# Altium footprint library UCP.PcbLib: 222 footprints (part 4 of 14)
Each footprint in its own frame and in the unit in brackets; x right, y up, seen from the top. Pads: shape width x height; smd on the part's side, far side on the other; paste and mask are expansions set on the pad; w line width, h text height; cw(c..) or ccw(c..) is an arc to the next point about the centre after c.
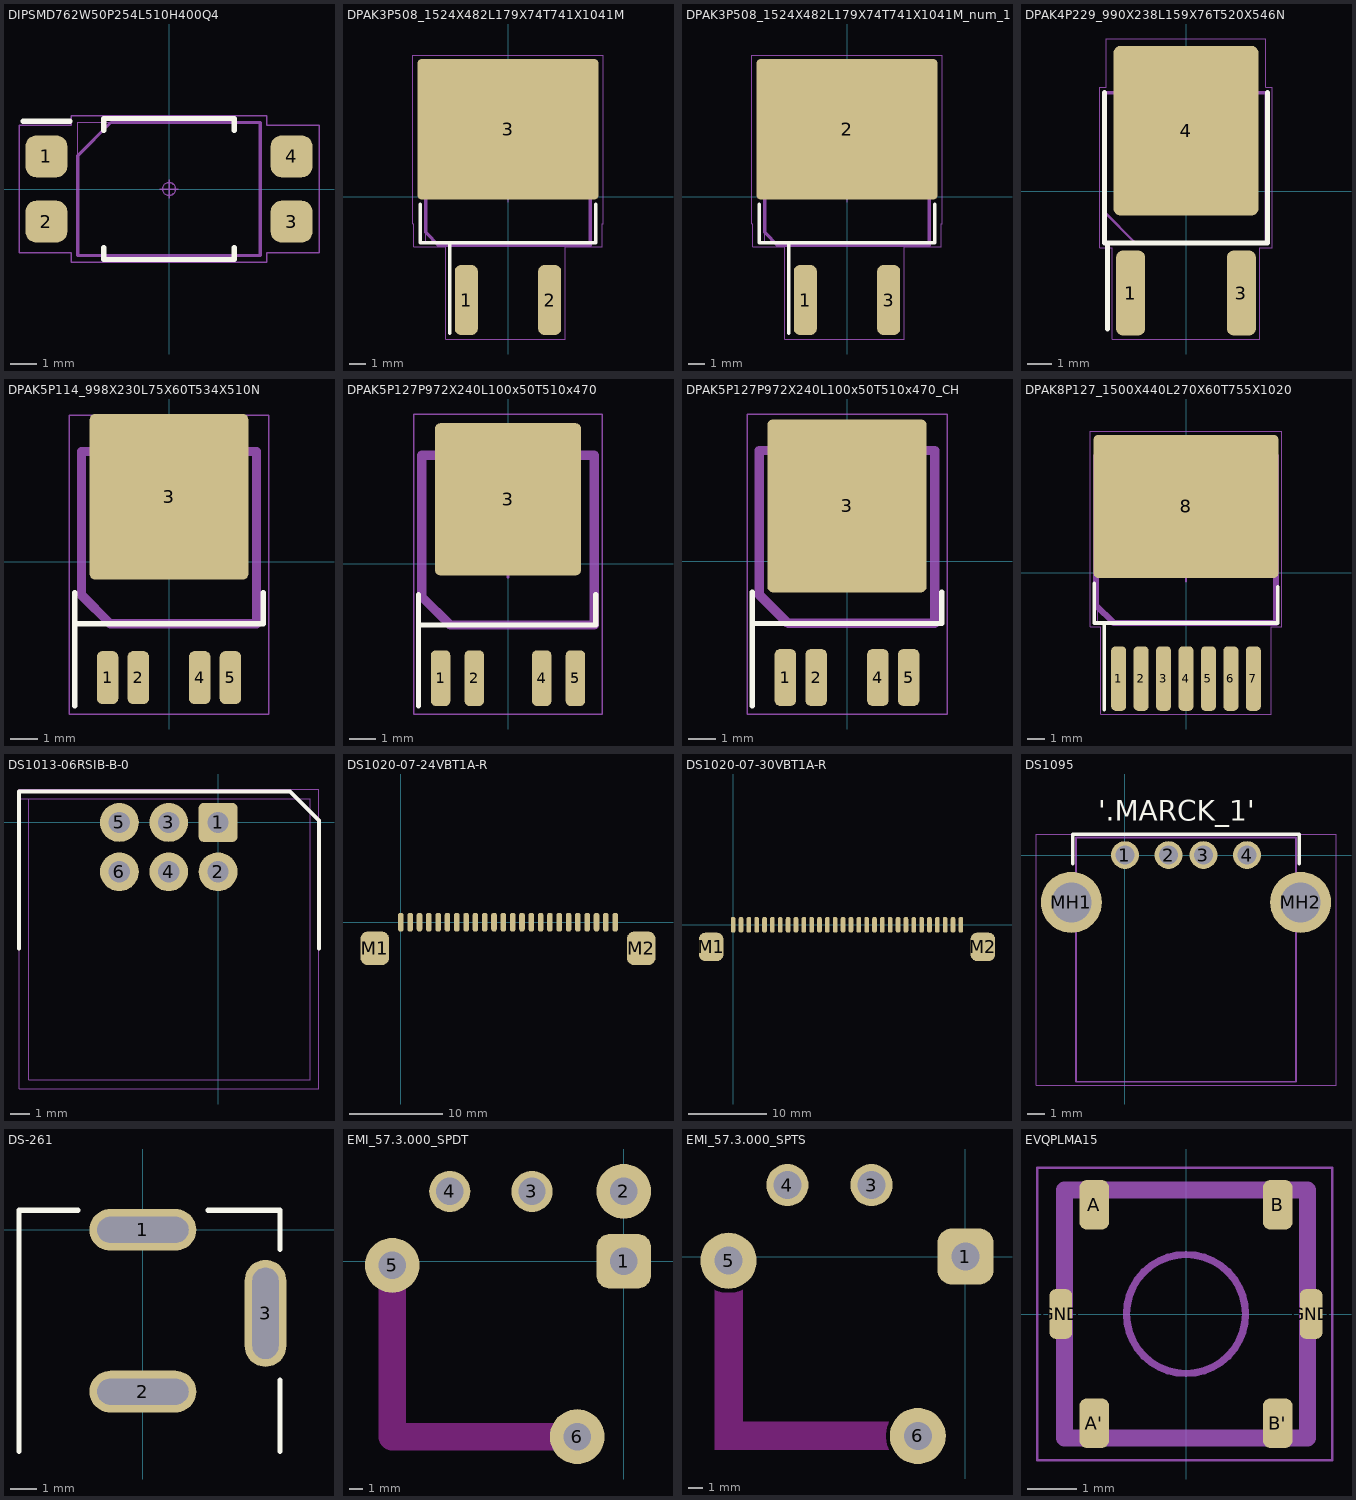
[diagram p3: the footprints below, top view; thin cyan lines are the x and y axes]

## DIPSMD762W50P254L510H400Q4 [mm] "DIP, 7.62 mm lead span, 2.54 mm pitch; 4 pin, 5.10 mm L X 7.00 mm W X 4.00 mm H body"
height 4
pads (4):
  rrect50% 1.6x1.6 smd: 1(-4.7,1.25) 2(-4.7,-1.25) 3(4.7,-1.25) 4(4.7,1.25)
Top Overlay:
  lines w0.2: -5.6,2.6 -3.8,2.6 ; -2.5,2.25 -2.5,2.7 2.5,2.7 2.5,2.25 ; -2.5,-2.25 -2.5,-2.7 2.5,-2.7 2.5,-2.25
Top Designator:
  text ".Designator" at -4.511,-0.453 h2
Top Assembly:
  lines w0.12: -3.5,-2.55 -3.5,1.28 -2.23,2.55 3.5,2.55 3.5,-2.55 -3.5,-2.55
Top Courtyard:
  circle w0.05: c0,0 r0.25
  lines w0.05: -0.35,0 0.35,0 ; 0,-0.35 0,0.35 ; -5.75,-2.45 -5.75,2.45 -3.75,2.45 -3.75,2.8 3.75,2.8 3.75,2.45 5.75,2.45 5.75,-2.45 3.75,-2.45 3.75,-2.8 -3.75,-2.8 -3.75,-2.45 -5.75,-2.45
Top Component Outline:
  lines w0.025: -3.5,-2.55 3.5,-2.55 3.5,2.55 -3.5,2.55 -3.5,-2.55
Top Component Terminal:
  lines w0.025: -5.15,-1.92 -5.15,-0.62 -4.55,-0.62 -4.55,-1.92 -5.15,-1.92 ; -5.15,0.62 -5.15,1.92 -4.55,1.92 -4.55,0.62 -5.15,0.62 ; 4.55,-1.92 4.55,-0.62 5.15,-0.62 5.15,-1.92 4.55,-1.92 ; 4.55,0.62 4.55,1.92 5.15,1.92 5.15,0.62 4.55,0.62
3D body "DIPSMD762W50P254L510H400Q4.stp": height 4.6, standoff 0, extent -5.23,-2.55 5.23,2.55

## DPAK3P508_1524X482L179X74T741X1041M [mm] "D2PAK, 5.08 mm pitch; 3 pin, 9.015 mm L X 10.16 mm W X 4.83 mm H body"
height 4.83
pads (3):
  rrect50% 1.4x4.25 smd: 1(-2.54,-6.3) 2(2.54,-6.3)
  rrect5% 11x8.55 smd paste-10.79: 3(0,4.1)
Top Overlay:
  lines w0.2: -5.34,-0.475 -5.34,-2.808 5.34,-2.808 5.34,-0.475 ; -3.54,-8.325 -3.54,-2.81
Top Paste:
  drawing of 42 lines, arcs and shapes, not listed
Top Designator:
  text ".Designator" at -4.511,-0.453 h2
Top Assembly:
  lines w0.2: -5.017,-2.175 -4.207,-2.985 5.017,-2.985 5.017,7.62 -5.017,7.62 -5.017,-2.175
Top Courtyard:
  lines w0.05: -0.35,0 0.35,0 ; 0,-0.35 0,0.35 ; -5.795,-1.66 -5.795,8.625 5.795,8.625 5.795,-1.66 5.74,-1.66 5.74,-3.058 3.49,-3.058 3.49,-8.675 -3.79,-8.675 -3.79,-3.058 -5.74,-3.058 -5.74,-1.66 -5.795,-1.66
Top Component Outline:
  lines w0.025: -5.017,-2.731 -5.017,6.414 5.017,6.414 5.017,-2.731 -5.017,-2.731
Top Component Terminal:
  lines w0.025: -5.335,0.027 5.335,0.027 5.335,7.65 -5.335,7.65 -5.335,0.027 ; -3.035,-7.62 -3.035,-5.16 -2.045,-5.16 -2.045,-7.62 -3.035,-7.62 ; 2.045,-7.62 2.045,-5.16 3.035,-5.16 3.035,-7.62 2.045,-7.62
3D body "TO-263.stp": height 4.84, standoff 0, extent -5.017,-7.621 5.017,7.619

## DPAK3P508_1524X482L179X74T741X1041M_num_1 [mm] "D2PAK, 5.08 mm pitch; 3 pin, 9.015 mm L X 10.16 mm W X 4.83 mm H body"
height 4.83
pads (3):
  rrect50% 1.4x4.25 smd paste-10: 1(-2.54,-6.3) 3(2.54,-6.3)
  rrect5% 11x8.55 smd paste-10.79: 2(0,4.1)
Top Overlay:
  lines w0.2: -5.34,-0.475 -5.34,-2.808 5.34,-2.808 5.34,-0.475 ; -3.54,-8.325 -3.54,-2.81
Top Paste:
  rectangle: -3.78,6 -2.58,7.2
  rectangle: -2.14,6 -0.94,7.2
  rectangle: -0.546,6 0.654,7.2
  rectangle: 1.049,6 2.249,7.2
  rectangle: 2.644,6 3.844,7.2
  rectangle: -3.78,4.4 -2.58,5.6
  rectangle: -2.14,4.4 -0.94,5.6
  rectangle: -0.546,4.4 0.654,5.6
  rectangle: 1.049,4.4 2.249,5.6
  rectangle: 2.644,4.4 3.844,5.6
  rectangle: -3.78,2.8 -2.58,4
  rectangle: -2.14,2.8 -0.94,4
  rectangle: -0.546,2.8 0.654,4
  rectangle: 1.049,2.8 2.249,4
  rectangle: 2.644,2.8 3.844,4
  rectangle: -3.78,1.2 -2.58,2.4
  rectangle: -2.14,1.2 -0.94,2.4
  rectangle: -0.546,1.2 0.654,2.4
  rectangle: 1.049,1.2 2.249,2.4
  rectangle: 2.644,1.2 3.844,2.4
  rectangle: -3.135,-8.275 -1.935,-4.325
  rectangle: 1.945,-8.275 3.145,-4.325
Top Designator:
  text ".Designator" at -4.511,-0.453 h2
Top Assembly:
  lines w0.2: -5.017,-2.175 -5.017,7.62 5.017,7.62 5.017,-2.985 -4.207,-2.985 -5.017,-2.175
Top Courtyard:
  lines w0.05: -0.35,0 0.35,0 ; 0,-0.35 0,0.35 ; -5.795,-1.66 -5.74,-1.66 -5.74,-3.058 -3.79,-3.058 -3.79,-8.675 3.49,-8.675 3.49,-3.058 5.74,-3.058 5.74,-1.66 5.795,-1.66 5.795,8.625 -5.795,8.625 -5.795,-1.66
Top Component Outline:
  lines w0.025: -5.017,-2.731 5.017,-2.731 5.017,6.414 -5.017,6.414 -5.017,-2.731
Top Component Terminal:
  lines w0.025: -5.335,0.027 -5.335,7.65 5.335,7.65 5.335,0.027 -5.335,0.027 ; -3.035,-7.62 -2.045,-7.62 -2.045,-5.16 -3.035,-5.16 -3.035,-7.62 ; 2.045,-7.62 3.035,-7.62 3.035,-5.16 2.045,-5.16 2.045,-7.62
3D body "TO-263.stp": height 4.84, standoff 0, extent -5.017,-7.621 5.017,7.619

## DPAK4P229_990X238L159X76T520X546N [mm] "DPAK, 2.29 mm pitch; 2 pin, 6.095 mm L X 6.54 mm W X 2.38 mm H body"
height 2.38
pads (3):
  rrect45% 1.2x3.5 smd: 1(-2.29,-4.2) 3(2.29,-4.2)
  rrect9% 6x7 smd paste-6.09: 4(0,2.51)
Top Overlay:
  lines w0.2: -3.37,4.092 -3.37,-2.127 3.37,-2.127 3.37,4.092 ; -3.25,-5.697 -3.25,-2.13
Top Paste:
  region: -0.445,3.82 -2.365,3.82 -2.365,5.26 -0.445,5.26
  region: -0.445,1.79 -2.365,1.79 -2.365,3.23 -0.445,3.23
  region: -0.445,-0.24 -2.365,-0.24 -2.365,1.2 -0.445,1.2
  region: 2.365,3.82 0.445,3.82 0.445,5.26 2.365,5.26
  region: 2.365,1.79 0.445,1.79 0.445,3.23 2.365,3.23
  region: 2.365,-0.24 0.445,-0.24 0.445,1.2 2.365,1.2
Top Designator:
  text ".Designator" at -4.511,-0.453 h2
Top Assembly:
  lines w0.1: -3.37,-0.857 -3.37,4.092 3.37,4.092 3.37,-2.127 -2.1,-2.127 -3.37,-0.857
Top Courtyard:
  circle w0.05: c0,0 r0.25
  lines w0.05: -0.35,0 0.35,0 ; 0,-0.35 0,0.35 ; -3.57,-2.33 -3.045,-2.33 -3.045,-6.1 3.045,-6.1 3.045,-2.33 3.57,-2.33 3.57,4.3 3.3,4.3 3.3,6.3 -3.3,6.3 -3.3,4.3 -3.57,4.3 -3.57,-2.33
Top Component Outline:
  lines w0.025: -3.27,-2.065 3.27,-2.065 3.27,4.03 -3.27,4.03 -3.27,-2.065
Top Component Terminal:
  lines w0.025: -2.73,-0.248 -2.73,4.952 2.73,4.952 2.73,-0.248 -2.73,-0.248 ; -2.67,-4.952 -2.67,-3.363 -1.91,-3.363 -1.91,-4.952 -2.67,-4.952 ; 1.91,-4.952 1.91,-3.363 2.67,-3.363 2.67,-4.952 1.91,-4.952
3D body "DPAK4P229_990X238L159X76T520X546.STEP": height 2.38, standoff 0, extent -3.27,-4.952 3.27,4.953

## DPAK5P114_998X230L75X60T534X510N [mm] "DPAK, 1.14 mm pitch; 6 pin, 6.12 mm L X 6.50 mm W X 2.30 mm H body"
height 2
pads (5):
  rrect50% 0.79x1.965 smd: 1(-2.28,-4.3) 2(-1.14,-4.3) 4(1.14,-4.3) 5(2.28,-4.3)
  rrect7% 5.9x6.15 smd: 3(0,2.418)
Top Overlay:
  lines w0.2: -3.5,-5.35 -3.5,-2.3 ; -3.5,-1.15 -3.5,-2.3 ; 3.5,-1.15 3.5,-2.3 -3.5,-2.3
Top Designator:
  text ".Designator" at -4.511,-0.453 h2
Top Assembly:
  lines w0.35: -3.25,-1.229 -3.25,4.1 3.25,4.1 3.25,-2.3 -2.179,-2.3 -3.25,-1.229
Top Courtyard:
  lines w0.05: -3.7,-5.65 3.7,-5.65 3.7,5.45 -3.7,5.45 -3.7,-5.65
  lines w0.1: -0.5,0 0.5,0 ; 0,-0.5 0,0.5
3D body "DPAK5-6P114_998X230L75X60T534X510N.stp": height 2.3, standoff 0, extent -3.25,-4.6 3.25,5.3

## DPAK5P127P972X240L100x50T510x470 [mm] "D-PAK, 5-Pads, Body 6,30x6,66mm (max), IPC Medium Density"
height 2.4
pads (5):
  rrect50% 0.73x2.1 smd: 1(-2.54,-4.3) 2(-1.27,-4.3) 4(1.27,-4.3) 5(2.54,-4.3)
  rrect7% 5.5x5.73 smd: 3(0,2.438)
Top Overlay:
  lines w0.2: -3.369,-5.35 -3.369,-2.3 ; -3.369,-1.15 -3.369,-2.3 ; 3.3,-1.15 3.3,-2.3 -3.369,-2.3
Top Designator:
  text ".Designator" at -4.511,-0.453 h2
Top Assembly:
  lines w0.35: -3.25,-1.229 -3.25,4.1 3.25,4.1 3.25,-2.3 -2.179,-2.3 -3.25,-1.229
Top Courtyard:
  lines w0.05: -3.55,-5.65 3.55,-5.65 3.55,5.65 -3.55,5.65 -3.55,-5.65
  lines w0.1: -0.5,0 0.5,0 ; 0,-0.5 0,0.5
3D body "TO-252AA.stp": height 2.41, standoff -0.26, extent -3.25,-4.863 3.25,4.862

## DPAK5P127P972X240L100x50T510x470_CH [mm] "D-PAK, 5-Pads, Body 6,30x6,66mm (max), IPC Medium Density"
height 2.4
pads (5):
  rrect50% 0.79x2.1 smd: 1(-2.28,-4.3) 2(-1.14,-4.3) 4(1.14,-4.3) 5(2.28,-4.3)
  rrect7% 5.9x6.4 smd: 3(0,2.05)
Top Overlay:
  lines w0.2: -3.5,-5.35 -3.5,-2.3 ; -3.5,-1.15 -3.5,-2.3 ; 3.5,-1.15 3.5,-2.3 -3.5,-2.3
Top Designator:
  text ".Designator" at -4.511,-0.453 h2
Top Assembly:
  lines w0.35: -3.25,-1.229 -3.25,4.1 3.25,4.1 3.25,-2.3 -2.179,-2.3 -3.25,-1.229
Top Courtyard:
  lines w0.05: -3.7,-5.65 3.7,-5.65 3.7,5.45 -3.7,5.45 -3.7,-5.65
  lines w0.1: -0.5,0 0.5,0 ; 0,-0.5 0,0.5
3D body "DPAK5-6P114_998X230L75X60T534X510N.stp": height 2.3, standoff 0, extent -3.25,-4.8 3.25,5.1

## DPAK8P127_1500X440L270X60T755X1020 [mm] "DPAK, 1.27 mm pitch; 8 pin, 9.25 mm L X 10.00 mm W X 4.40 mm H body"
height 4.4
pads (8):
  rrect60% 0.85x3.65 smd: 1(-3.81,-5.995) 2(-2.54,-5.995) 3(-1.27,-5.995) 4(0,-5.995) 5(1.27,-5.995) 6(2.54,-5.995) 7(3.81,-5.995)
  rrect6% 10.45x8.1 smd: 8(0,3.75)
Top Overlay:
  lines w0.2: -5.2,-0.6 -5.2,-2.85 5.2,-2.85 5.2,-0.8 ; -4.625,-7.75 -4.625,-2.85
Top Assembly:
  lines w0.35: -5.1,-1.85 -4.1,-2.85 5.1,-2.85 5.1,6.6 -5.1,6.6 -5.1,-1.85
Top Courtyard:
  lines w0.05: 5.375,8 -5.425,8 -5.425,-3.05 -4.825,-3.05 -4.825,-8 4.825,-8 4.825,-3.05 5.425,-3.05 5.425,8
  lines w0.1: -0.5,0 0.5,0 ; 0,-0.5 0,0.5
Top Component Outline:
  lines w0.05: -5,-2.75 5,-2.75 5,6.5 -5,6.5 -5,-2.75
3D body "DPAK8P127_1500X440L270X60T755X1020_AD.step": height 4.5, standoff 0, extent -5.1,-7.45 5.1,7.55

## DS1013-06RSIB-B-0 [mm]
pads (6):
  rrect25% 2x2 hole 1.1 paste-2: 1(0,0)
  round 2 hole 1.1 paste-2: 2(0,-2.54) 3(-2.54,0) 4(-2.54,-2.54) 5(-5.08,0) 6(-5.08,-2.54)
Top Overlay:
  lines w0.2: -10.25,-6.5 -10.25,1.6 3.7,1.6 5.2,0.1 5.2,-6.5
Top Designator:
  text ".Designator" at -1.801,2.257 h2
Top Assembly:
  lines w0.05: -10.25,-13.7 -10.25,1.23 4.07,1.23 5.2,0.1 5.2,-13.7 -10.25,-13.7
Top Courtyard:
  circle w0.05: c0,-2.54 r0.25
  lines w0.05: -0.35,-2.54 0.35,-2.54 ; 0,-2.89 0,-2.19 ; -10.25,-13.7 -10.25,1.7 5.2,1.7 5.2,-13.7 -10.25,-13.7
Top Component Outline:
  lines w0.05: -9.75,-13.25 -9.75,1.23 4.75,1.23 4.75,-13.25 -9.75,-13.25
Top Component Terminal:
  lines w0.05: -5.4,-2.86 -5.4,-2.22 -4.76,-2.22 -4.76,-2.86 -5.4,-2.86 ; -5.4,-0.32 -4.76,-0.32 -4.76,0.32 -5.4,0.32 -5.4,-0.32 ; -2.86,-2.86 -2.86,-2.22 -2.22,-2.22 -2.22,-2.86 -2.86,-2.86 ; -2.86,-0.32 -2.22,-0.32 -2.22,0.32 -2.86,0.32 -2.86,-0.32 ; -0.32,-2.86 -0.32,-2.22 0.32,-2.22 0.32,-2.86 -0.32,-2.86 ; -0.32,-0.32 -0.32,0.32 0.32,0.32 0.32,-0.32 -0.32,-0.32
3D body "DS1013-6R (IDC-6R CONNFLY).stp": height 8.8, standoff -3, extent -10.25,-13.893 5.17,0.127

## DS1020-07-24VBT1A-R [mm] "1.00mm FPC ZIF R/A SMT Type"
height 3
pads (26):
  rrect83% 0.6x2 smd: 1(0,0) 2(1,0) 3(2,0) 4(3,0) 5(4,0) 6(5,0) 7(6,0) 8(7,0) 9(8,0) 10(9,0) 11(10,0) 12(11,0) 13(12,0) 14(13,0) 15(14,0) 16(15,0) 17(16,0) 18(17,0) 19(18,0) 20(19,0) 21(20,0) 22(21,0) 23(22,0) 24(23,0)
  rrect50% 3.1x3.6 smd: M1(-2.8,-2.8) M2(25.8,-2.8)
Top Designator:
  text ".Designator" at -4.511,-0.453 h2

## DS1020-07-30VBT1A-R [mm] "1.00mm FPC ZIF R/A SMT Type 30 Pin"
height 3
pads (32):
  rrect83% 0.6x2 smd: 1(0,0) 2(1,0) 3(2,0) 4(3,0) 5(4,0) 6(5,0) 7(6,0) 8(7,0) 9(8,0) 10(9,0) 11(10,0) 12(11,0) 13(12,0) 14(13,0) 15(14,0) 16(15,0) 17(16,0) 18(17,0) 19(18,0) 20(19,0) 21(20,0) 22(21,0) 23(22,0) 24(23,0) 25(24,0) 26(25,0) 27(26,0) 28(27,0) 29(28,0) 30(29,0)
  rrect50% 3.1x3.6 smd: M1(-2.8,-2.8) M2(31.8,-2.8)
Top Designator:
  text ".Designator" at -4.511,-0.453 h2
3D body "522713069.stp": height 3, standoff 0, extent -4,-6.65 33,0.75

## DS1095 [mm]
pads (6):
  round 1.6 hole 1.1: 1(0,0) 2(2.5,0) 3(4.5,0) 4(7,0)
  round 3.5 hole 2.3: MH1(-3.07,-2.71) MH2(10.07,-2.71)
Top Overlay:
  lines w0.2: -3,-0.5 -3,1.2 10,1.2 10,-0.5
  text "'.MARCK_1'" at -1.523,1.57 h2
Bottom Overlay:
  circle w0.5: c-1.8,0 r0.25
Top Designator:
  text ".Designator" at -4.511,-0.453 h2
Top Assembly:
  lines w0.1: -2.8,-12.99 9.8,-12.99 9.8,1.01 -2.8,1.01 -2.8,-12.99
Top Courtyard:
  lines w0.05: -5.1,-13.19 -5.1,1.21 12.1,1.21 12.1,-13.19 -5.1,-13.19
3D body "DS1095.stp": height 7.76, standoff -3.61, extent -4.617,-12.99 11.617,1.01

## DS-261 [mm]
height 2.5
pads (3):
  oval 4.1x1.6 hole 1 slot 3.5 at 0 deg: 1(0,0) 2(0,-6.2)
  oval 1.6x4.1 hole 1 slot 3.5 at 90 deg: 3(4.7,-3.2)
Top Overlay:
  lines w0.2: -4.75,-8.5 -4.75,0.75 -3.05,0.75 -2.5,0.75 ; 2.5,0.75 3.05,0.75 5.25,0.75 5.25,-0.75 ; 5.25,-8.5 5.25,-5.75
3D body "DS-261B.stp": height 11, standoff -4.1, extent -4.4,-13.9 4.9,0

## EMI_57.3.000_SPDT [mm] "Бескорпусное реле серии ЭМИ (Одна Переключающая группа)"
height 16
pads (6):
  rrect50% 4x4 hole 2: 1(0,0)
  round 4 hole 2: 2(0,5.1) 5(-16.9,-0.3) 6(-3.4,-12.8)
  round 3 hole 2: 3(-6.7,5.1) 4(-12.7,5.1)
Top Layer keep-out:
  lines w2: -16.9,-0.3 -16.9,-12.8 -3.4,-12.8
Top Designator:
  text ".Designator" at -4.511,-0.453 h2
3D body "EMI_57.3.00.stp": height 16.5, standoff -4, extent -20.584,-15.717 3.2,8.728

## EMI_57.3.000_SPTS [mm] "Бескорпусное реле серии ЭМИ (Одна Замыкающая группа)"
height 16
pads (5):
  rrect50% 4x4 hole 2: 1(0,0)
  round 3 hole 2: 3(-6.7,5.1) 4(-12.7,5.1)
  round 4 hole 2: 5(-16.9,-0.3) 6(-3.4,-12.8)
Top Layer keep-out:
  region: -17.9,-2.371 -17.782,-2.424 -17.538,-2.51 -17.286,-2.567 -17.029,-2.596 -16.771,-2.596 -16.514,-2.567 -16.262,-2.51 -16.018,-2.424 -15.9,-2.371 -15.9,-11.8 -5.471,-11.8 -5.524,-11.918 -5.61,-12.162 -5.667,-12.414 -5.696,-12.671 -5.696,-12.929 -5.667,-13.186 -5.61,-13.438 -5.524,-13.682 -5.471,-13.8 -17.9,-13.8
Top Designator:
  text ".Designator" at -4.511,-0.453 h2
3D body "EMI_57.3.00.stp": height 16.5, standoff -4, extent -20.584,-15.717 3.2,8.728

## EVQPLMA15 [mm]
height 1.7
pads (6):
  rrect50% 0.6x1 smd mask+0.1: A(-1.85,2.2) A'(-1.85,-2.2) B(1.85,2.2) B'(1.85,-2.2)
  rrect50% 0.45x1 smd mask+0.1: GND(-2.525,0) GND(2.525,0)
Top Designator:
  text ".Designator" at -4.511,-0.453 h2
Top Assembly:
  circle w0.15: c0,0 r1.2
  lines w0.35: -2.45,-2.5 2.45,-2.5 2.45,2.5 -2.45,2.5 -2.45,-2.5
Top Courtyard:
  lines w0.05: -3,-2.95 -3,2.95 2.95,2.95 2.95,-2.95 -3,-2.95
Top Component Outline:
  lines w0.05: -2.45,-2.5 -2.45,2.5 2.45,2.5 2.45,-2.5 -2.45,-2.5
3D body "EVQ-PLD_PLH_PLM_3PL_PT5_PT9-A15.STEP": height 1.5, standoff 0, extent -2.45,-2.5 2.45,2.5